# Altium footprint library Miscellaneous Devices.PcbLib: 306 footprints (part 20 of 20)
Each footprint in its own frame and in the unit in brackets; x right, y up, seen from the top. Pads: shape width x height; smd on the part's side, far side on the other; paste and mask are expansions set on the pad; w line width, h text height; cw(c..) or ccw(c..) is an arc to the next point about the centre after c.
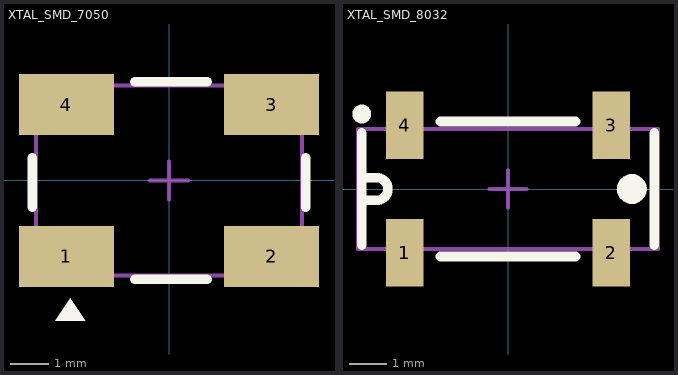
[diagram p19: the footprints below, top view; thin cyan lines are the x and y axes]

## XTAL_SMD_7050 [mm]
pads (4):
  rect 2.5x1.6 smd: 1(-2.7,-2) 2(2.7,-2) 3(2.7,2) 4(-2.7,2)
Top Overlay:
  region: -2.6,-3.1 -3,-3.7 -2.2,-3.7
  lines w0.254: -3.6,-0.7 -3.6,0.6 ; -0.9,-2.6 1,-2.6 ; -0.9,2.6 1,2.6 ; 3.6,-0.7 3.6,0.6
Mechanical 15:
  lines w0.1: -0.5,0 0.5,0 ; 0,-0.5 0,0.5 ; -3.5,-2.5 3.5,-2.5 3.5,2.5 -3.5,2.5 -3.5,-2.5
3D body: height 1.8, standoff 0, extent -3.5,-2.6 3.5,2.48

## XTAL_SMD_8032 [mm] "DMX-26S"
pads (4):
  rect 1x1.8 smd: 1(-2.75,-1.7) 2(2.75,-1.7) 3(2.75,1.7) 4(-2.75,1.7)
Top Overlay:
  circle w0.4: c3.3,0 r0.2
  circle w0.3: c-3.9,2 r0.1
  lines w0.254: -3.9,-1.5 -3.9,1.5 ; -3.9,-0.3 -3.5,-0.3 ccw(c-3.5,0) -3.5,0.3 -3.9,0.3 ; -1.8,-1.8 1.8,-1.8 ; -1.8,1.8 1.8,1.8 ; 3.9,-1.5 3.9,1.5
Mechanical 15:
  lines w0.1: -0.5,0 0.5,0 ; 0,-0.5 0,0.5 ; -4,-1.6 -4,1.6 4,1.6 4,-1.6 -4,-1.6
3D body: height 2.5, standoff 0.01, extent -3.95,-1.85 3.95,1.85